# Altium footprint library PcbLib1.PcbLib: 5 footprints
Each footprint in its own frame and in the unit in brackets; x right, y up, seen from the top. Pads: shape width x height; smd on the part's side, far side on the other; paste and mask are expansions set on the pad; w line width, h text height; cw(c..) or ccw(c..) is an arc to the next point about the centre after c.
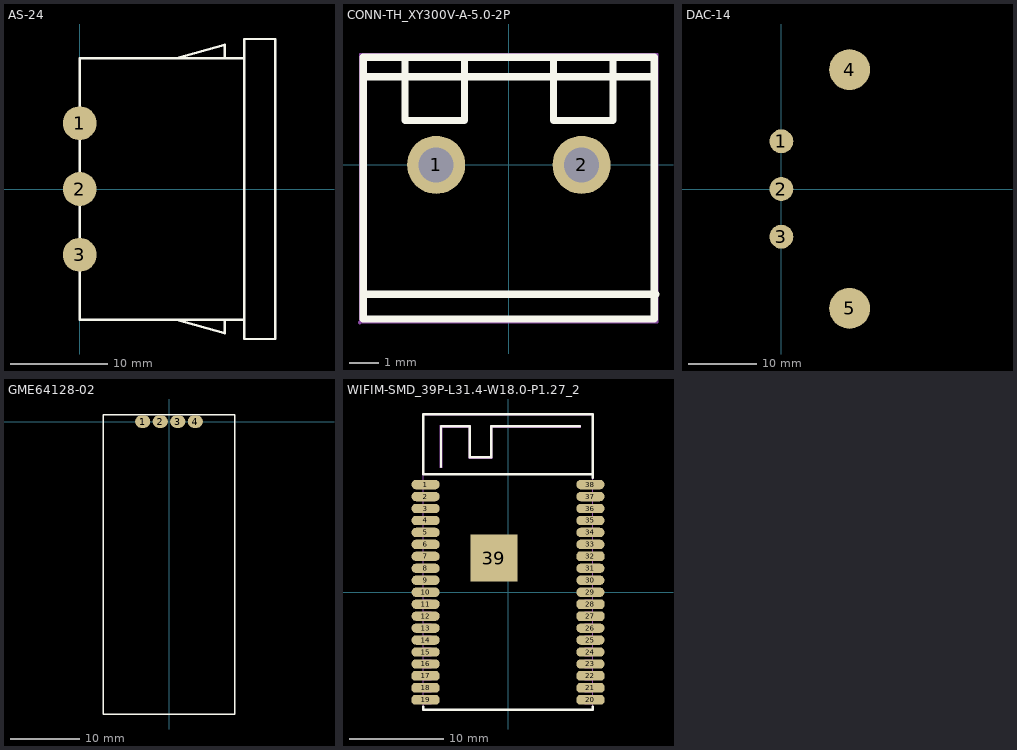
[diagram p0: the footprints below, top view; thin cyan lines are the x and y axes]

## AS-24 [mm]
pads (3):
  round 3.5 all layers, no hole: 1(0,6.8) 2(0,0) 3(0,-6.8)
Top Overlay:
  lines w0.25: 10,-13.5 15,-14.9 15,-13.5 ; 10,13.5 15,14.9 15,13.5 ; 17,-13.5 0,-13.5 0,13.5 17,13.5 ; 17,-15.5 17,15.5 20.2,15.5 20.2,-15.5 17,-15.5
3D body: height 20, standoff 0, extent 0,-15.5 20.2,15.5

## CONN-TH_XY300V-A-5.0-2P [mm]
height 0.55
pads (2):
  round 2 hole 1.2: 1(-2.5,0) 2(2.5,0)
Top Overlay:
  lines w0.254: -5,3.034 5,3.034 ; -4.953,-4.445 5.047,-4.445 ; -3.569,3.7 -3.569,1.524 -1.524,1.524 -1.524,3.7 ; 1.536,3.7 1.536,1.524 3.581,1.524 3.581,3.7 ; -5,-5.3 5,-5.3 5,3.7 -5,3.7 -5,-5.3
Mechanical 15:
  region: -5.067,-5.427 -5.067,-5.452 -5.102,-5.487 -5.152,-5.487 -5.187,-5.452 -5.187,-5.427 -5.187,-5.402 -5.152,-5.367 -5.102,-5.367 -5.067,-5.402 -5.067,-5.427
  region: -2,0 -2,-0.099 -2.076,-0.283 -2.217,-0.424 -2.401,-0.5 -2.599,-0.5 -2.783,-0.424 -2.924,-0.283 -3,-0.099 -3,0 -3,0.099 -2.924,0.283 -2.783,0.424 -2.599,0.5 -2.401,0.5 -2.217,0.424 -2.076,0.283 -2,0.099 -2,0
  region: 3,0 3,-0.099 2.924,-0.283 2.783,-0.424 2.599,-0.5 2.401,-0.5 2.217,-0.424 2.076,-0.283 2,-0.099 2,0 2,0.099 2.076,0.283 2.217,0.424 2.401,0.5 2.599,0.5 2.783,0.424 2.924,0.283 3,0.099 3,0
  lines w0.051: -5.127,-5.427 5.127,-5.427 5.127,3.827 -5.127,3.827 -5.127,-5.427
3D body: height 12.5, standoff 0, extent -5,-5.3 5,3.7

## DAC-14 [mm]
height 0.55
pads (5):
  round 3.5 all layers, no hole: 1(0,7) 2(0,0) 3(0,-7)
  round 6 all layers, no hole: 4(10,17.5) 5(10,-17.5)
Bottom Overlay:
  lines w0.1: 18,-22 18,22 ; -1.5,-22 21,-22 21,22 -1.5,22 -1.5,-22
3D body: height 26, standoff 0, extent -1.5,-22 21,22

## GME64128-02 [mm]
height 1.7
pads (4):
  oval 2.2x1.8 hole 0.2: 1(-3.81,0) 2(-1.27,0) 3(1.27,0) 4(3.81,0)
Top Overlay:
  lines w0.2: -9.5,-42.3 9.5,-42.3 9.5,1 -9.5,1 -9.5,-42.3
3D body: height 5.27, standoff 0, extent -9.5,-42.3 9.5,1

## WIFIM-SMD_39P-L31.4-W18.0-P1.27_2 [mm]
height 0.55
pads (39):
  oval 3x1 smd paste+0 mask+0.051: 1(-8.75,11.43) 2(-8.75,10.16) 3(-8.75,8.89) 4(-8.75,7.62) 5(-8.75,6.35) 6(-8.75,5.08) 7(-8.75,3.81) 8(-8.75,2.54) 9(-8.75,1.27) 10(-8.75,0) 11(-8.75,-1.27) 12(-8.75,-2.54) 13(-8.75,-3.81) 14(-8.75,-5.08) 15(-8.75,-6.35) 16(-8.75,-7.62) 23(8.75,-7.62) 24(8.75,-6.35) 25(8.75,-5.08) 26(8.75,-3.81) 29(8.75,0) 30(8.75,1.27) 31(8.75,2.54) 33(8.75,5.08) 34(8.75,6.35) 35(8.75,7.62) 36(8.75,8.89) 37(8.75,10.16) 38(8.75,11.43)
  oct 3x1 smd paste+0 mask+0.051: 17(-8.75,-8.89) 18(-8.75,-10.16) 19(-8.75,-11.43) 20(8.75,-11.43) 21(8.75,-10.16) 22(8.75,-8.89) 27(8.75,-2.54) 28(8.75,-1.27) 32(8.75,3.81)
  rect 5x5 smd paste+0 mask+0.051: 39(-1.5,3.62)
Top Overlay:
  lines w0.254: -9.017,-12.161 -9.017,-12.48 9.017,-12.48 9.017,-12.161 ; -7.112,13.301 -7.112,17.619 -4.064,17.619 -4.064,14.317 -1.778,14.317 -1.778,17.619 7.62,17.619 ; 9.017,12.158 9.017,12.539 -9.017,12.539 -9.017,18.889 9.017,18.889 9.017,12.161
Mechanical 6:
  region: -6.99,13.24 -6.99,17.48 -6.98,17.49 -4.19,17.49 -4.19,14.18 -1.66,14.18 -1.65,14.17 -1.65,17.49 7.69,17.49 7.7,17.48 7.7,17.72 7.68,17.74 -1.89,17.74 -1.89,14.44 -3.93,14.44 -3.93,17.74 -3.94,17.75 -7.24,17.75 -7.24,13.24
Mechanical 15:
  drawing of 44 lines, arcs and shapes, not listed
3D body "asdf.STEP": height 3.31, standoff 0, extent -9.001,-12.538 9.001,18.862